# Altium footprint library 5P0SMDJ36CA.PcbLib: 3 footprints
Each footprint in its own frame and in the unit in brackets; x right, y up, seen from the top. Pads: shape width x height; smd on the part's side, far side on the other; paste and mask are expansions set on the pad; w line width, h text height; cw(c..) or ccw(c..) is an arc to the next point about the centre after c.
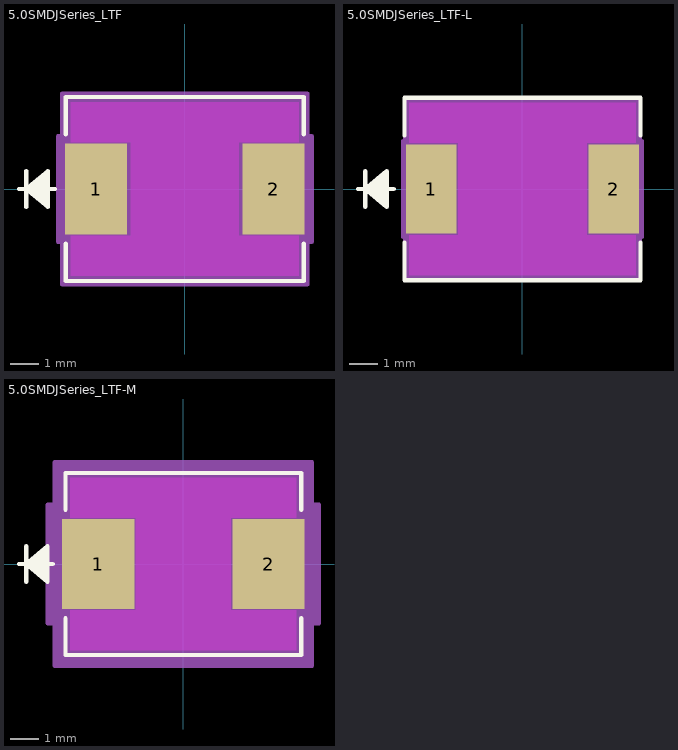
[diagram p0: the footprints below, top view; thin cyan lines are the x and y axes]

## 5.0SMDJSeries_LTF [mil]
pads (2):
  rect 85.59x126 smd paste+0 mask+0: 1(-123.11,0) 2(123.11,0)
Top Layer keep-out:
  region: -158,-120.5 -158,-65 158,-65 158,-120.5
  region: -158,65 -158,120.5 158,120.5 158,65
  region: -75,-65 -75,65 75,65 75,-65
Top Overlay:
  lines w6: -230,0 -180,0 ; -220,-25 -220,25 ; -190,-20 -220,0 ; -190,-15 -220,0 ; -190,-10 -220,0 ; -190,-5 -220,0 ; -190,5 -220,0 ; -190,10 -220,0 ; -190,15 -220,0 ; -190,20 -220,0 ; -165,-76.1 -165,-127.5 165,-127.5 165,-76.1 ; -165,76.1 -165,127.5 165,127.5 165,76.1 ; -220,0 -190,-25 -190,25 -220,0
  text ".Designator" at -137.5,-25 h50
Keep-Out Layer:
  region: -75,-65 -75,65 75,65 75,-65
Mechanical 13:
  lines w1: -230,0 -180,0 ; -220,-25 -220,25 ; -190,-20 -220,0 ; -190,-15 -220,0 ; -190,-10 -220,0 ; -190,-5 -220,0 ; -190,5 -220,0 ; -190,10 -220,0 ; -190,15 -220,0 ; -190,20 -220,0 ; -220,0 -190,-25 -190,25 -220,0 ; -160,-122.5 -160,122.5 160,122.5 160,-122.5 -160,-122.5
  text ".Designator" at -137.5,-25 h50
Mechanical 15:
  region: -170,-73 -175.91,-73 -175.91,73 -170,73 -170,132.5 170,132.5 170,73 175.91,73 175.91,-73 170,-73 170,-132.5 -170,-132.5
  lines w6: -175.91,-73 -170,-73 -170,-132.5 170,-132.5 170,-73 175.91,-73 175.91,73 170,73 170,132.5 -170,132.5 -170,73 -175.91,73 -175.91,-73
3D body "50SMDJSeries_LTF.step": height 105, standoff 0, extent -160,-122.52 160,122.52

## 5.0SMDJSeries_LTF-L [mil]
pads (2):
  rect 70.63x124.03 smd paste+0 mask+0: 1(-127.44,0) 2(127.44,0)
Top Layer keep-out:
  region: -90.13,-65 -90.13,65 90.13,65 90.13,-65
  region: -158,65 -158,120.5 158,120.5 158,65
  region: -158,-120.5 -158,-65 158,-65 158,-120.5
Top Overlay:
  lines w6: -230,0 -180,0 ; -220,-25 -220,25 ; -190,-20 -220,0 ; -190,-15 -220,0 ; -190,-10 -220,0 ; -190,-5 -220,0 ; -190,5 -220,0 ; -190,10 -220,0 ; -190,15 -220,0 ; -190,20 -220,0 ; -165,-74.92 -165,-127.5 165,-127.5 165,-74.92 ; -165,74.92 -165,127.5 165,127.5 165,74.92 ; -220,0 -190,25 -190,-25 -220,0
  text ".Designator" at -137.5,-25 h50
Keep-Out Layer:
  region: -90.13,-65 -90.13,65 90.13,65 90.13,-65
Mechanical 13:
  lines w1: -230,0 -180,0 ; -220,-25 -220,25 ; -190,-20 -220,0 ; -190,-15 -220,0 ; -190,-10 -220,0 ; -190,-5 -220,0 ; -190,5 -220,0 ; -190,10 -220,0 ; -190,15 -220,0 ; -190,20 -220,0 ; -220,0 -190,25 -190,-25 -220,0 ; -160,-122.5 160,-122.5 160,122.5 -160,122.5 -160,-122.5
  text ".Designator" at -137.5,-25 h50
Mechanical 15:
  region: -164,-67 -166.76,-67 -166.76,67 -164,67 -164,126.5 164,126.5 164,67 166.76,67 166.76,-67 164,-67 164,-126.5 -164,-126.5
  lines w6: -166.76,-67 -166.76,67 -164,67 -164,126.5 164,126.5 164,67 166.76,67 166.76,-67 164,-67 164,-126.5 -164,-126.5 -164,-67 -166.76,-67
3D body: height 10, standoff 0, extent 0,0 10,10

## 5.0SMDJSeries_LTF-M [mil]
pads (2):
  rect 101.34x126 smd paste+0 mask+0: 1(-119.17,0) 2(119.17,0)
Top Layer keep-out:
  region: -66.5,-65 -66.5,65 66.5,65 66.5,-65
  region: -158,65 -158,120.5 158,120.5 158,65
  region: -158,-120.5 -158,-65 158,-65 158,-120.5
Top Overlay:
  lines w6: -230,0 -182.94,0 ; -220,-25 -220,25 ; -190,-20 -220,0 ; -190,-15 -220,0 ; -190,-10 -220,0 ; -190,-5 -220,0 ; -190,5 -220,0 ; -190,10 -220,0 ; -190,15 -220,0 ; -190,20 -220,0 ; -165,-76.1 -165,-127.5 165,-127.5 165,-76.1 ; -165,76.1 -165,127.5 165,127.5 165,76.1 ; -220,0 -190,25 -190,-25 -220,0
  text ".Designator" at -137.5,-25 h50
Keep-Out Layer:
  region: -66.5,-65 -66.5,65 66.5,65 66.5,-65
Mechanical 13:
  lines w1: -230,0 -180,0 ; -220,-25 -220,25 ; -190,-20 -220,0 ; -190,-15 -220,0 ; -190,-10 -220,0 ; -190,-5 -220,0 ; -190,5 -220,0 ; -190,10 -220,0 ; -190,15 -220,0 ; -190,20 -220,0 ; -220,0 -190,25 -190,-25 -220,0 ; -160,-122.5 160,-122.5 160,122.5 -160,122.5 -160,-122.5
  text ".Designator" at -137.5,-25 h50
Mechanical 15:
  region: -180,-83 -189.84,-83 -189.84,83 -180,83 -180,142.5 180,142.5 180,83 189.84,83 189.84,-83 180,-83 180,-142.5 -180,-142.5
  lines w6: -189.84,-83 -189.84,83 -180,83 -180,142.5 180,142.5 180,83 189.84,83 189.84,-83 180,-83 180,-142.5 -180,-142.5 -180,-83 -189.84,-83
3D body: height 10, standoff 0, extent 0,0 10,10